# Altium footprint library touchpad_star_20mm.PcbLib: 1 footprints
Each footprint in its own frame and in the unit in brackets; x right, y up, seen from the top. Pads: shape width x height; smd on the part's side, far side on the other; paste and mask are expansions set on the pad; w line width, h text height; cw(c..) or ccw(c..) is an arc to the next point about the centre after c.
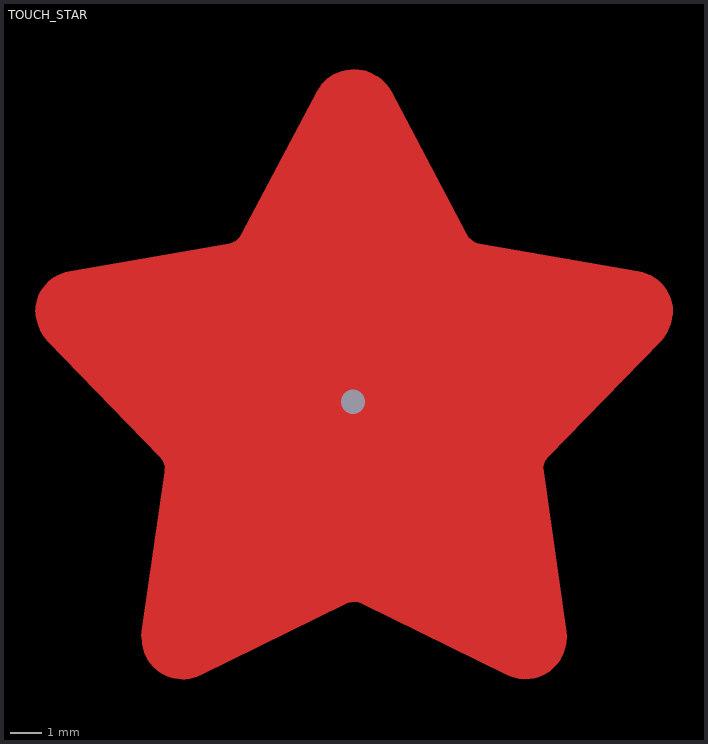
[diagram p0: the footprint, top view; thin cyan lines are the x and y axes]

## TOUCH_STAR [mil]
pads (1):
  round 1 hole 30 mask+0: 1(-49605,-49655)
Top Layer:
  region: -49864.66,-49966.72 -49860.78,-49974.75 -49857.29,-49979.89 -49854.02,-49983.72 -49847.35,-49989.65 -49842.16,-49993.05 -49837.66,-49995.33 -49832.95,-49997.15 -49828.09,-49998.51 -49823.12,-49999.38 -49818.09,-49999.75 -49813.05,-49999.63 -49808.04,-49999.01 -49799.42,-49996.72 -49793.97,-49994.41 -49614.01,-49905.92 -49609.52,-49904.26 -49607.17,-49903.77 -49602.39,-49903.53 -49597.66,-49904.26 -49593.17,-49905.92 -49413.21,-49994.41 -49408.85,-49996.31 -49402.93,-49998.2 -49397.99,-49999.19 -49392.97,-49999.7 -49384.06,-49999.38 -49379.09,-49998.51 -49374.23,-49997.15 -49368.47,-49994.84 -49360.77,-49990.34 -49355.93,-49986.44 -49349.88,-49979.89 -49346.39,-49974.75 -49342.52,-49966.72 -49340.68,-49960.79 -49339.72,-49955.84 -49339.26,-49950.82 -49339.29,-49945.77 -49339.75,-49941.04 -49368.29,-49742.54 -49368.49,-49737.76 -49367.72,-49733.03 -49366.98,-49730.75 -49364.82,-49726.47 -49361.85,-49722.72 -49222.08,-49578.91 -49218.21,-49574.44 -49213.36,-49566.95 -49211.23,-49562.38 -49209.55,-49557.62 -49208.15,-49551.57 -49207.55,-49546.56 -49207.71,-49537.65 -49208.74,-49531.52 -49210.11,-49526.67 -49213.69,-49518.5 -49216.33,-49514.2 -49220.13,-49509.29 -49223.64,-49505.67 -49227.49,-49502.41 -49235.02,-49497.63 -49239.61,-49495.53 -49244.38,-49493.89 -49250.14,-49492.55 -49447.74,-49458.36 -49452.36,-49457.07 -49456.61,-49454.87 -49458.55,-49453.47 -49461.96,-49450.09 -49464.61,-49446.11 -49558.19,-49268.74 -49560.6,-49264.64 -49563.54,-49260.54 -49567.69,-49255.93 -49571.45,-49252.57 -49575.53,-49249.6 -49583.38,-49245.37 -49589.23,-49243.27 -49597.97,-49241.52 -49604.17,-49241.22 -49613.05,-49242.1 -49619.07,-49243.61 -49623.79,-49245.37 -49628.33,-49247.59 -49635.73,-49252.57 -49639.49,-49255.93 -49642.91,-49259.64 -49646.58,-49264.64 -49648.99,-49268.74 -49742.57,-49446.11 -49745.22,-49450.09 -49748.63,-49453.47 -49752.64,-49456.08 -49754.82,-49457.07 -49759.44,-49458.36 -49957.03,-49492.55 -49962.8,-49493.89 -49967.57,-49495.53 -49972.16,-49497.63 -49976.52,-49500.17 -49983.54,-49505.67 -49987.05,-49509.29 -49990.18,-49513.24 -49992.92,-49517.49 -49995.22,-49521.98 -49997.42,-49527.78 -49999.33,-49536.49 -49999.75,-49542.68 -49999.54,-49547.72 -49998.83,-49552.72 -49996.38,-49561.3 -49994.35,-49565.91 -49991.24,-49571.29 -49988.25,-49575.35 -49985.1,-49578.91 -49845.33,-49722.72 -49842.36,-49726.47 -49840.2,-49730.75 -49839.46,-49733.03 -49838.69,-49737.76 -49838.89,-49742.54 -49867.43,-49941.04 -49867.94,-49946.93 -49867.46,-49955.84 -49866.21,-49961.92
  lines w0.5: -49999.75,-49542.68 -49999.33,-49536.49 -49997.42,-49527.78 -49995.22,-49521.98 -49992.92,-49517.49 -49990.18,-49513.24 -49987.05,-49509.29 -49983.54,-49505.67 -49976.52,-49500.17 -49972.16,-49497.63 -49967.57,-49495.53 -49962.8,-49493.89 -49957.03,-49492.55 -49759.44,-49458.36 -49754.82,-49457.07 -49752.64,-49456.08 -49748.63,-49453.47 -49745.22,-49450.09 -49742.57,-49446.11 -49648.99,-49268.74 -49646.58,-49264.64 -49642.91,-49259.64 -49639.49,-49255.93 -49635.73,-49252.57 -49628.33,-49247.59 -49623.79,-49245.37 -49619.07,-49243.61 -49613.05,-49242.1 -49604.17,-49241.22 -49597.97,-49241.52 -49589.23,-49243.27 -49583.38,-49245.37 -49575.53,-49249.6 -49571.45,-49252.57 -49567.69,-49255.93 -49563.54,-49260.54 -49560.6,-49264.64 -49558.19,-49268.74 -49464.61,-49446.11 -49461.96,-49450.09 -49458.55,-49453.47 -49456.61,-49454.87 -49452.36,-49457.07 -49447.74,-49458.36 -49250.14,-49492.55 -49244.38,-49493.89 -49239.61,-49495.53 -49235.02,-49497.63 -49227.49,-49502.41 -49223.64,-49505.67 -49220.13,-49509.29 -49216.33,-49514.2 -49213.69,-49518.5 -49210.11,-49526.67 -49208.74,-49531.52 -49207.71,-49537.65 -49207.55,-49546.56 -49208.15,-49551.57 -49209.55,-49557.62 -49211.23,-49562.38 -49213.36,-49566.95 -49218.21,-49574.44 -49222.08,-49578.91 -49361.85,-49722.72 -49364.82,-49726.47 -49366.98,-49730.75 -49367.72,-49733.03 -49368.49,-49737.76 -49368.29,-49742.54 -49339.75,-49941.04 -49339.29,-49945.77 -49339.26,-49950.82 -49339.72,-49955.84 -49340.68,-49960.79 -49342.52,-49966.72 -49346.39,-49974.75 -49349.88,-49979.89 -49355.93,-49986.44 -49360.77,-49990.34 -49368.47,-49994.84 -49374.23,-49997.15 -49379.09,-49998.51 -49384.06,-49999.38 -49392.97,-49999.7 -49397.99,-49999.19 -49402.93,-49998.2 -49408.85,-49996.31 -49413.21,-49994.41 -49593.17,-49905.92 -49597.66,-49904.26 -49602.39,-49903.53 -49607.17,-49903.77 -49609.52,-49904.26 -49614.01,-49905.92 -49793.97,-49994.41 -49799.42,-49996.72 -49808.04,-49999.01 -49813.05,-49999.63 -49818.09,-49999.75 -49823.12,-49999.38 -49828.09,-49998.51 -49832.95,-49997.15 -49837.66,-49995.33 -49842.16,-49993.05 -49847.35,-49989.65 -49854.02,-49983.72 -49857.29,-49979.89 -49860.78,-49974.75 -49864.66,-49966.72 -49866.21,-49961.92 -49867.46,-49955.84 -49867.94,-49946.93 -49867.43,-49941.04 -49838.89,-49742.54 -49838.69,-49737.76 -49839.46,-49733.03 -49840.2,-49730.75 -49842.36,-49726.47 -49845.33,-49722.72 -49985.1,-49578.91 -49988.25,-49575.35 -49991.24,-49571.29 -49994.35,-49565.91 -49996.38,-49561.3 -49998.83,-49552.72 -49999.54,-49547.72 -49999.75,-49542.68